# Altium footprint library WR-TBL_Pluggable Connector_3.50mm.PcbLib: 175 footprints (part 5 of 11)
Each footprint in its own frame and in the unit in brackets; x right, y up, seen from the top. Pads: shape width x height; smd on the part's side, far side on the other; paste and mask are expansions set on the pad; w line width, h text height; cw(c..) or ccw(c..) is an arc to the next point about the centre after c.
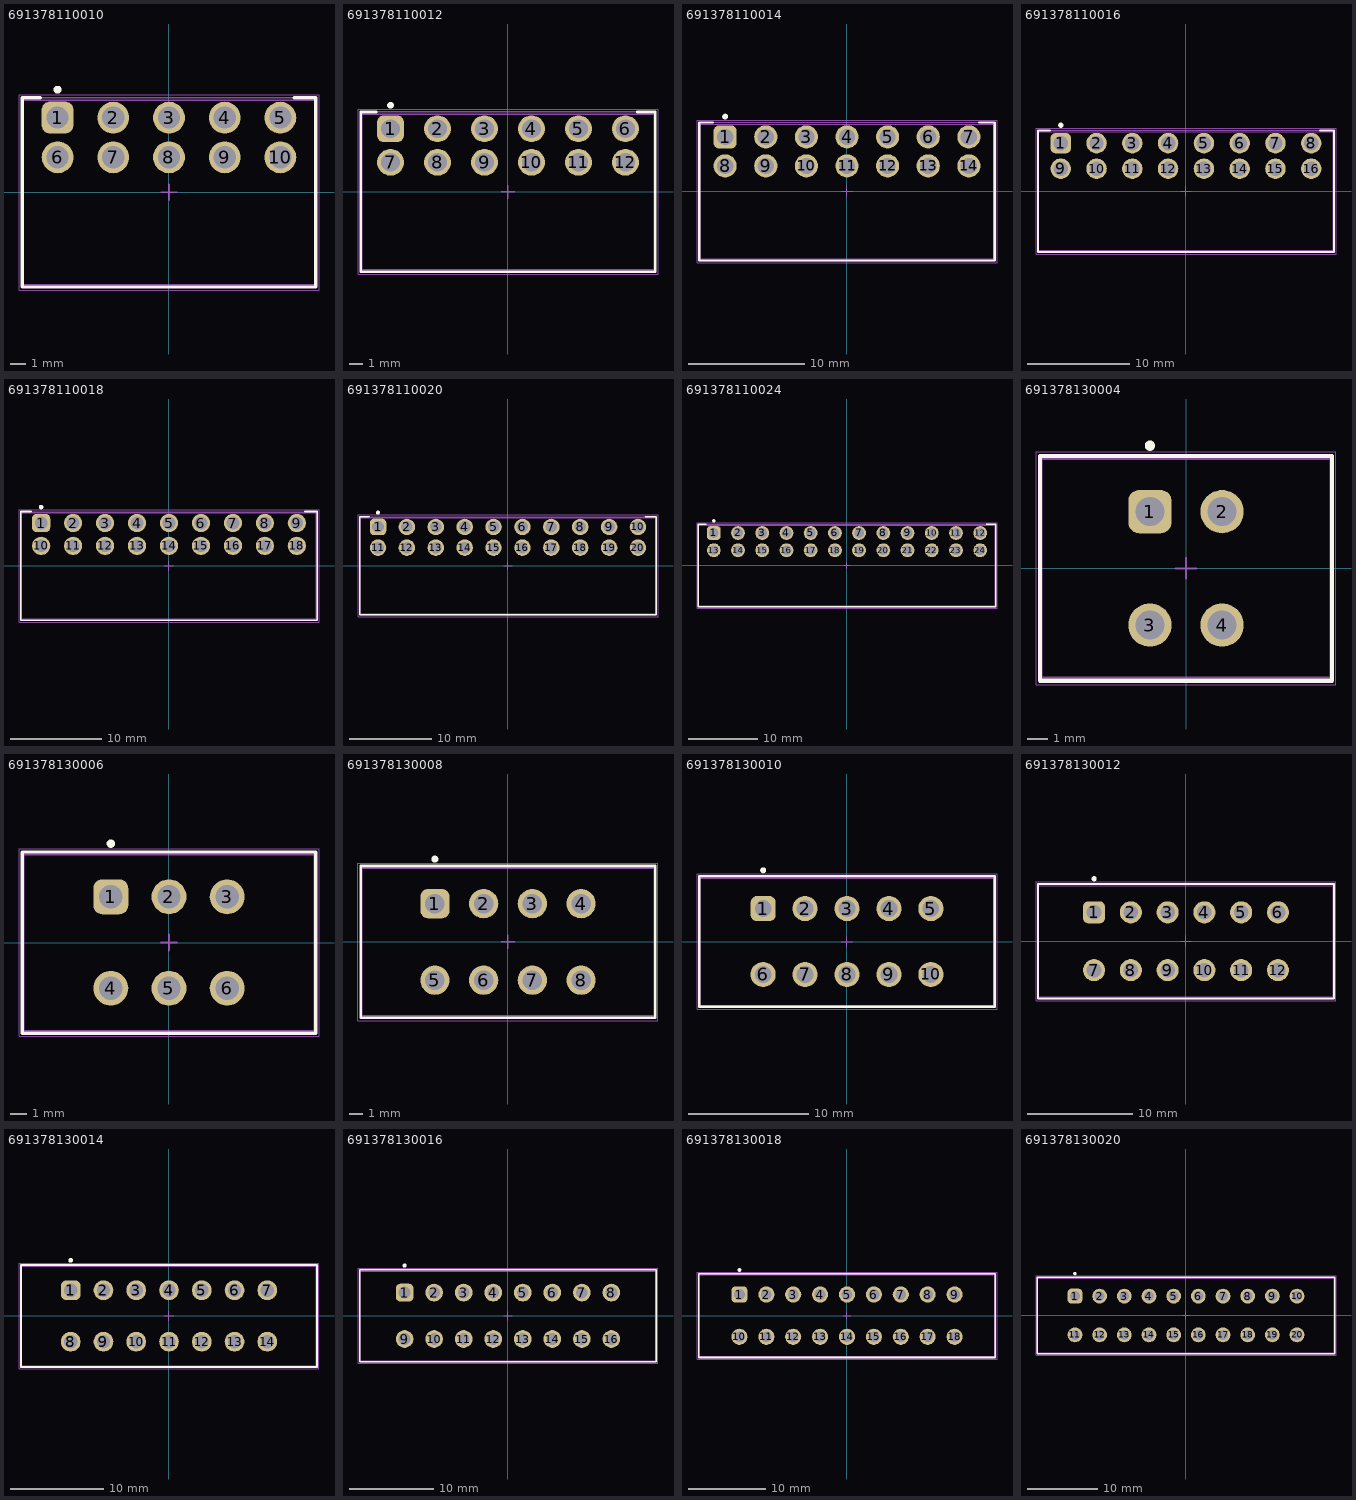
[diagram p4: the footprints below, top view; thin cyan lines are the x and y axes]

## 691378110010 [mm] "PCB Header, Horizontal, pitch 3.5mm, 10p"
height 10.8
pads (10):
  rrect50% 2x2 hole 1.4: 1(-7,4.7)
  round 2 hole 1.4: 2(-3.5,4.7) 3(0,4.7) 4(3.5,4.7) 5(7,4.7) 6(-7,2.2) 7(-3.5,2.2) 8(0,2.2) 9(3.5,2.2) 10(7,2.2)
Top Overlay:
  circle w0.25: c-7,6.45 r0.125
  lines w0.2: -8.075,5.95 -9.225,5.95 -9.225,-5.95 9.225,-5.95 9.225,5.95 7.875,5.95
Top Assembly:
  lines w0.1: -9.225,-5.95 -9.225,5.95 9.225,5.95 9.225,-5.95 -9.225,-5.95
Top Designator:
  text ".Designator" at -3.647,-0.357 h1
Top 3D Body:
  lines w0.1: -9.15,-5.8 -9.15,5.8 9.15,5.8 9.15,-5.8 -9.15,-5.8
Top Courtyard:
  lines w0.05: -9.425,-6.15 -9.425,6.15 9.425,6.15 9.425,-6.15 -9.425,-6.15
Top Component Center:
  lines w0.1: -0.5,0 0.5,0 ; 0,-0.5 0,0.5
3D body "691378110010.stp": height 10.9, standoff -3.4, extent -9.15,-5.8 9.15,5.8

## 691378110012 [mm] "PCB Header, Horizontal, pitch 3.5mm, 12p"
height 10.8
pads (12):
  rrect50% 2x2 hole 1.4: 1(-8.75,4.7)
  round 2 hole 1.4: 2(-5.25,4.7) 3(-1.75,4.7) 4(1.75,4.7) 5(5.25,4.7) 6(8.75,4.7) 7(-8.75,2.2) 8(-5.25,2.2) 9(-1.75,2.2) 10(1.75,2.2) 11(5.25,2.2) 12(8.75,2.2)
Top Overlay:
  circle w0.25: c-8.75,6.45 r0.125
  lines w0.2: -9.825,5.95 -10.975,5.95 -10.975,-5.95 10.975,-5.95 10.975,5.95 9.625,5.95
Top Assembly:
  lines w0.1: -10.975,-5.95 -10.975,5.95 10.975,5.95 10.975,-5.95 -10.975,-5.95
Top Designator:
  text ".Designator" at -3.647,-0.357 h1
Top 3D Body:
  lines w0.1: -10.9,-5.8 -10.9,5.8 10.9,5.8 10.9,-5.8 -10.9,-5.8
Top Courtyard:
  lines w0.05: -11.175,-6.15 -11.175,6.15 11.175,6.15 11.175,-6.15 -11.175,-6.15
Top Component Center:
  lines w0.1: -0.5,0 0.5,0 ; 0,-0.5 0,0.5
3D body "691378110012.stp": height 10.9, standoff -3.4, extent -10.9,-5.8 10.9,5.8

## 691378110014 [mm] "PCB Header, Horizontal, pitch 3.5mm, 14p"
height 10.8
pads (14):
  rrect50% 2x2 hole 1.4: 1(-10.5,4.7)
  round 2 hole 1.4: 2(-7,4.7) 3(-3.5,4.7) 4(0,4.7) 5(3.5,4.7) 6(7,4.7) 7(10.5,4.7) 8(-10.5,2.2) 9(-7,2.2) 10(-3.5,2.2) 11(0,2.2) 12(3.5,2.2) 13(7,2.2) 14(10.5,2.2)
Top Overlay:
  circle w0.25: c-10.5,6.45 r0.125
  lines w0.2: -11.575,5.95 -12.725,5.95 -12.725,-5.95 12.725,-5.95 12.725,5.95 11.375,5.95
Top Assembly:
  lines w0.1: -12.725,-5.95 -12.725,5.95 12.725,5.95 12.725,-5.95 -12.725,-5.95
Top Designator:
  text ".Designator" at -3.647,-0.357 h1
Top 3D Body:
  lines w0.1: -12.65,-5.8 -12.65,5.8 12.65,5.8 12.65,-5.8 -12.65,-5.8
Top Courtyard:
  lines w0.05: -12.925,-6.15 -12.925,6.15 12.925,6.15 12.925,-6.15 -12.925,-6.15
Top Component Center:
  lines w0.1: -0.5,0 0.5,0 ; 0,-0.5 0,0.5
3D body "691378110014.stp": height 10.9, standoff -3.4, extent -12.65,-5.8 12.65,5.8

## 691378110016 [mm] "PCB Header, Horizontal, pitch 3.5mm, 16p"
height 10.8
pads (16):
  rrect50% 2x2 hole 1.4: 1(-12.25,4.7)
  round 2 hole 1.4: 2(-8.75,4.7) 3(-5.25,4.7) 4(-1.75,4.7) 5(1.75,4.7) 6(5.25,4.7) 7(8.75,4.7) 8(12.25,4.7) 9(-12.25,2.2) 10(-8.75,2.2) 11(-5.25,2.2) 12(-1.75,2.2) 13(1.75,2.2) 14(5.25,2.2) 15(8.75,2.2) 16(12.25,2.2)
Top Overlay:
  circle w0.25: c-12.25,6.45 r0.125
  lines w0.2: -13.325,5.95 -14.475,5.95 -14.475,-5.95 14.475,-5.95 14.475,5.95 13.125,5.95
Top Assembly:
  lines w0.1: -14.475,-5.95 -14.475,5.95 14.475,5.95 14.475,-5.95 -14.475,-5.95
Top Designator:
  text ".Designator" at -3.647,-0.357 h1
Top 3D Body:
  lines w0.1: -14.4,-5.8 -14.4,5.8 14.4,5.8 14.4,-5.8 -14.4,-5.8
Top Courtyard:
  lines w0.05: -14.675,-6.15 -14.675,6.15 14.675,6.15 14.675,-6.15 -14.675,-6.15
Top Component Center:
  lines w0.1: -0.5,0 0.5,0 ; 0,-0.5 0,0.5
3D body "691378110016.stp": height 10.9, standoff -3.4, extent -14.4,-5.8 14.4,5.8

## 691378110018 [mm] "PCB Header, Horizontal, pitch 3.5mm, 18p"
height 10.8
pads (18):
  rrect50% 2x2 hole 1.4: 1(-14,4.7)
  round 2 hole 1.4: 2(-10.5,4.7) 3(-7,4.7) 4(-3.5,4.7) 5(0,4.7) 6(3.5,4.7) 7(7,4.7) 8(10.5,4.7) 9(14,4.7) 10(-14,2.2) 11(-10.5,2.2) 12(-7,2.2) 13(-3.5,2.2) 14(0,2.2) 15(3.5,2.2) 16(7,2.2) 17(10.5,2.2) 18(14,2.2)
Top Overlay:
  circle w0.25: c-14,6.45 r0.125
  lines w0.2: -15.075,5.95 -16.225,5.95 -16.225,-5.95 16.225,-5.95 16.225,5.95 14.875,5.95
Top Assembly:
  lines w0.1: -16.225,-5.95 -16.225,5.95 16.225,5.95 16.225,-5.95 -16.225,-5.95
Top Designator:
  text ".Designator" at -3.647,-0.357 h1
Top 3D Body:
  lines w0.1: -16.15,-5.8 -16.15,5.8 16.15,5.8 16.15,-5.8 -16.15,-5.8
Top Courtyard:
  lines w0.05: -16.425,-6.15 -16.425,6.15 16.425,6.15 16.425,-6.15 -16.425,-6.15
Top Component Center:
  lines w0.1: -0.5,0 0.5,0 ; 0,-0.5 0,0.5
3D body "691378110018.stp": height 10.9, standoff -3.4, extent -16.15,-5.8 16.15,5.8

## 691378110020 [mm] "PCB Header, Horizontal, pitch 3.5mm, 20p"
height 10.8
pads (20):
  rrect50% 2x2 hole 1.4: 1(-15.75,4.7)
  round 2 hole 1.4: 2(-12.25,4.7) 3(-8.75,4.7) 4(-5.25,4.7) 5(-1.75,4.7) 6(1.75,4.7) 7(5.25,4.7) 8(8.75,4.7) 9(12.25,4.7) 10(15.75,4.7) 11(-15.75,2.2) 12(-12.25,2.2) 13(-8.75,2.2) 14(-5.25,2.2) 15(-1.75,2.2) 16(1.75,2.2) 17(5.25,2.2) 18(8.75,2.2) 19(12.25,2.2) 20(15.75,2.2)
Top Overlay:
  circle w0.25: c-15.75,6.45 r0.125
  lines w0.2: -16.825,5.95 -17.975,5.95 -17.975,-5.95 17.975,-5.95 17.975,5.95 16.625,5.95
Top Assembly:
  lines w0.1: -17.975,-5.95 17.975,-5.95 17.975,5.95 -17.975,5.95 -17.975,-5.95
Top Designator:
  text ".Designator" at -3.647,-0.357 h1
Top 3D Body:
  lines w0.1: -17.9,-5.8 17.9,-5.8 17.9,5.8 -17.9,5.8 -17.9,-5.8
Top Courtyard:
  lines w0.05: -18.175,-6.15 18.175,-6.15 18.175,6.15 -18.175,6.15 -18.175,-6.15
Top Component Center:
  lines w0.1: -0.5,0 0.5,0 ; 0,-0.5 0,0.5
3D body "691378110020.stp": height 10.9, standoff -3.4, extent -17.9,-5.8 17.9,5.8

## 691378110024 [mm] "PCB Header, Horizontal, pitch 3.5mm, 24p"
height 10.8
pads (24):
  rrect50% 2x2 hole 1.4: 1(-19.25,4.7)
  round 2 hole 1.4: 2(-15.75,4.7) 3(-12.25,4.7) 4(-8.75,4.7) 5(-5.25,4.7) 6(-1.75,4.7) 7(1.75,4.7) 8(5.25,4.7) 9(8.75,4.7) 10(12.25,4.7) 11(15.75,4.7) 12(19.25,4.7) 13(-19.25,2.2) 14(-15.75,2.2) 15(-12.25,2.2) 16(-8.75,2.2) 17(-5.25,2.2) 18(-1.75,2.2) 19(1.75,2.2) 20(5.25,2.2) 21(8.75,2.2) 22(12.25,2.2) 23(15.75,2.2) 24(19.25,2.2)
Top Overlay:
  circle w0.25: c-19.25,6.45 r0.125
  lines w0.2: -20.325,5.95 -21.475,5.95 -21.475,-5.95 21.475,-5.95 21.475,5.95 20.125,5.95
Top Assembly:
  lines w0.1: -21.475,-5.95 21.475,-5.95 21.475,5.95 -21.475,5.95 -21.475,-5.95
Top Designator:
  text ".Designator" at -3.647,-0.357 h1
Top 3D Body:
  lines w0.1: -21.4,-5.8 21.4,-5.8 21.4,5.8 -21.4,5.8 -21.4,-5.8
Top Courtyard:
  lines w0.05: -21.675,-6.15 21.675,-6.15 21.675,6.15 -21.675,6.15 -21.675,-6.15
Top Component Center:
  lines w0.1: -0.5,0 0.5,0 ; 0,-0.5 0,0.5
3D body "691378110024.stp": height 10.9, standoff -3.4, extent -21.4,-5.8 21.4,5.8

## 691378130004 [mm] "PCB Header, pitch 3.5mm, 04p"
height 10
pads (4):
  rrect50% 2.1x2.1 hole 1.4: 1(-1.75,2.75)
  round 2.1 hole 1.4: 2(1.75,2.75) 3(-1.75,-2.75) 4(1.75,-2.75)
Top Overlay:
  circle w0.25: c-1.75,5.95 r0.125
  lines w0.2: -7.075,-5.45 7.075,-5.45 7.075,5.45 -7.075,5.45 -7.075,-5.45
Top Assembly:
  lines w0.1: -7.075,-5.45 7.075,-5.45 7.075,5.45 -7.075,5.45 -7.075,-5.45
Top Designator:
  text ".Designator" at -3.647,-0.357 h1
Top 3D Body:
  lines w0.1: -7,-5.3 7,-5.3 7,5.3 -7,5.3 -7,-5.3
Top Courtyard:
  lines w0.05: -7.275,-5.65 7.275,-5.65 7.275,5.65 -7.275,5.65 -7.275,-5.65
Top Component Center:
  lines w0.1: -0.5,0 0.5,0 ; 0,-0.5 0,0.5
3D body "691378130004.stp": height 10.05, standoff -3.45, extent -7,-5.3 7,5.3

## 691378130006 [mm] "PCB Header, pitch 3.5mm, 06p"
height 10
pads (6):
  rrect50% 2.1x2.1 hole 1.4: 1(-3.5,2.75)
  round 2.1 hole 1.4: 2(0,2.75) 3(3.5,2.75) 4(-3.5,-2.75) 5(0,-2.75) 6(3.5,-2.75)
Top Overlay:
  circle w0.25: c-3.5,5.95 r0.125
  lines w0.2: -8.825,-5.45 8.825,-5.45 8.825,5.45 -8.825,5.45 -8.825,-5.45
Top Assembly:
  lines w0.1: -8.825,-5.45 8.825,-5.45 8.825,5.45 -8.825,5.45 -8.825,-5.45
Top Designator:
  text ".Designator" at -3.647,-0.357 h1
Top 3D Body:
  lines w0.1: -8.75,-5.3 8.75,-5.3 8.75,5.3 -8.75,5.3 -8.75,-5.3
Top Courtyard:
  lines w0.05: -9.025,-5.65 9.025,-5.65 9.025,5.65 -9.025,5.65 -9.025,-5.65
Top Component Center:
  lines w0.1: -0.5,0 0.5,0 ; 0,-0.5 0,0.5
3D body "691378130006.stp": height 10.05, standoff -3.45, extent -8.75,-5.3 8.75,5.3

## 691378130008 [mm] "PCB Header, pitch 3.5mm, 08p"
height 10
pads (8):
  rrect50% 2.1x2.1 hole 1.4: 1(-5.25,2.75)
  round 2.1 hole 1.4: 2(-1.75,2.75) 3(1.75,2.75) 4(5.25,2.75) 5(-5.25,-2.75) 6(-1.75,-2.75) 7(1.75,-2.75) 8(5.25,-2.75)
Top Overlay:
  circle w0.25: c-5.25,5.95 r0.125
  lines w0.2: -10.575,-5.45 10.575,-5.45 10.575,5.45 -10.575,5.45 -10.575,-5.45
Top Assembly:
  lines w0.1: -10.575,-5.45 10.575,-5.45 10.575,5.45 -10.575,5.45 -10.575,-5.45
Top Designator:
  text ".Designator" at -3.647,-0.357 h1
Top 3D Body:
  lines w0.1: -10.5,-5.3 10.5,-5.3 10.5,5.3 -10.5,5.3 -10.5,-5.3
Top Courtyard:
  lines w0.05: -10.775,-5.65 10.775,-5.65 10.775,5.65 -10.775,5.65 -10.775,-5.65
Top Component Center:
  lines w0.1: -0.5,0 0.5,0 ; 0,-0.5 0,0.5
3D body "691378130008.stp": height 10.05, standoff -3.45, extent -10.5,-5.3 10.5,5.3

## 691378130010 [mm] "PCB Header, pitch 3.5mm, 10p"
height 10
pads (10):
  rrect50% 2.1x2.1 hole 1.4: 1(-7,2.75)
  round 2.1 hole 1.4: 2(-3.5,2.75) 3(0,2.75) 4(3.5,2.75) 5(7,2.75) 6(-7,-2.75) 7(-3.5,-2.75) 8(0,-2.75) 9(3.5,-2.75) 10(7,-2.75)
Top Overlay:
  circle w0.25: c-7,5.95 r0.125
  lines w0.2: -12.325,-5.45 -12.325,5.45 12.325,5.45 12.325,-5.45 -12.325,-5.45
Top Assembly:
  lines w0.1: -12.325,-5.45 -12.325,5.45 12.325,5.45 12.325,-5.45 -12.325,-5.45
Top Designator:
  text ".Designator" at -3.647,-0.357 h1
Top 3D Body:
  lines w0.1: -12.25,-5.3 -12.25,5.3 12.25,5.3 12.25,-5.3 -12.25,-5.3
Top Courtyard:
  lines w0.05: -12.525,-5.65 -12.525,5.65 12.525,5.65 12.525,-5.65 -12.525,-5.65
Top Component Center:
  lines w0.1: -0.5,0 0.5,0 ; 0,-0.5 0,0.5
3D body "691378130010.stp": height 10.05, standoff -3.45, extent -12.25,-5.3 12.25,5.3

## 691378130012 [mm] "PCB Header, pitch 3.5mm, 12p"
height 10
pads (12):
  rrect50% 2.1x2.1 hole 1.4: 1(-8.75,2.75)
  round 2.1 hole 1.4: 2(-5.25,2.75) 3(-1.75,2.75) 4(1.75,2.75) 5(5.25,2.75) 6(8.75,2.75) 7(-8.75,-2.75) 8(-5.25,-2.75) 9(-1.75,-2.75) 10(1.75,-2.75) 11(5.25,-2.75) 12(8.75,-2.75)
Top Overlay:
  circle w0.25: c-8.75,5.95 r0.125
  lines w0.2: -14.075,-5.45 14.075,-5.45 14.075,5.45 -14.075,5.45 -14.075,-5.45
Top Assembly:
  lines w0.1: -14.075,-5.45 14.075,-5.45 14.075,5.45 -14.075,5.45 -14.075,-5.45
Top Designator:
  text ".Designator" at -3.647,-0.357 h1
Top 3D Body:
  lines w0.1: -14,-5.3 14,-5.3 14,5.3 -14,5.3 -14,-5.3
Top Courtyard:
  lines w0.05: -14.275,-5.65 14.275,-5.65 14.275,5.65 -14.275,5.65 -14.275,-5.65
Top Component Center:
  lines w0.1: -0.5,0 0.5,0 ; 0,-0.5 0,0.5
3D body "691378130012.stp": height 10.05, standoff -3.45, extent -14,-5.3 14,5.3

## 691378130014 [mm] "PCB Header, pitch 3.5mm, 14p"
height 10
pads (14):
  rrect50% 2.1x2.1 hole 1.4: 1(-10.5,2.75)
  round 2.1 hole 1.4: 2(-7,2.75) 3(-3.5,2.75) 4(0,2.75) 5(3.5,2.75) 6(7,2.75) 7(10.5,2.75) 8(-10.5,-2.75) 9(-7,-2.75) 10(-3.5,-2.75) 11(0,-2.75) 12(3.5,-2.75) 13(7,-2.75) 14(10.5,-2.75)
Top Overlay:
  circle w0.25: c-10.5,5.95 r0.125
  lines w0.2: -15.825,-5.45 -15.825,5.45 15.825,5.45 15.825,-5.45 -15.825,-5.45
Top Assembly:
  lines w0.1: -15.825,-5.45 -15.825,5.45 15.825,5.45 15.825,-5.45 -15.825,-5.45
Top Designator:
  text ".Designator" at -3.647,-0.357 h1
Top 3D Body:
  lines w0.1: -15.75,-5.3 -15.75,5.3 15.75,5.3 15.75,-5.3 -15.75,-5.3
Top Courtyard:
  lines w0.05: -16.025,-5.65 -16.025,5.65 16.025,5.65 16.025,-5.65 -16.025,-5.65
Top Component Center:
  lines w0.1: -0.5,0 0.5,0 ; 0,-0.5 0,0.5
3D body "691378130014.stp": height 10.05, standoff -3.45, extent -15.75,-5.3 15.75,5.3

## 691378130016 [mm] "PCB Header, pitch 3.5mm, 16p"
height 10
pads (16):
  rrect50% 2.1x2.1 hole 1.4: 1(-12.25,2.75)
  round 2.1 hole 1.4: 2(-8.75,2.75) 3(-5.25,2.75) 4(-1.75,2.75) 5(1.75,2.75) 6(5.25,2.75) 7(8.75,2.75) 8(12.25,2.75) 9(-12.25,-2.75) 10(-8.75,-2.75) 11(-5.25,-2.75) 12(-1.75,-2.75) 13(1.75,-2.75) 14(5.25,-2.75) 15(8.75,-2.75) 16(12.25,-2.75)
Top Overlay:
  circle w0.25: c-12.25,5.95 r0.125
  lines w0.2: -17.575,-5.45 -17.575,5.45 17.575,5.45 17.575,-5.45 -17.575,-5.45
Top Assembly:
  lines w0.1: -17.575,-5.45 -17.575,5.45 17.575,5.45 17.575,-5.45 -17.575,-5.45
Top Designator:
  text ".Designator" at -3.647,-0.357 h1
Top 3D Body:
  lines w0.1: -17.5,-5.3 -17.5,5.3 17.5,5.3 17.5,-5.3 -17.5,-5.3
Top Courtyard:
  lines w0.05: -17.775,-5.65 -17.775,5.65 17.775,5.65 17.775,-5.65 -17.775,-5.65
Top Component Center:
  lines w0.1: -0.5,0 0.5,0 ; 0,-0.5 0,0.5
3D body "691378130016.stp": height 10.05, standoff -3.45, extent -17.5,-5.3 17.5,5.3

## 691378130018 [mm] "PCB Header, pitch 3.5mm, 18p"
height 10
pads (18):
  rrect50% 2.1x2.1 hole 1.4: 1(-14,2.75)
  round 2.1 hole 1.4: 2(-10.5,2.75) 3(-7,2.75) 4(-3.5,2.75) 5(0,2.75) 6(3.5,2.75) 7(7,2.75) 8(10.5,2.75) 9(14,2.75) 10(-14,-2.75) 11(-10.5,-2.75) 12(-7,-2.75) 13(-3.5,-2.75) 14(0,-2.75) 15(3.5,-2.75) 16(7,-2.75) 17(10.5,-2.75) 18(14,-2.75)
Top Overlay:
  circle w0.25: c-14,5.95 r0.125
  lines w0.2: -19.325,-5.45 19.325,-5.45 19.325,5.45 -19.325,5.45 -19.325,-5.45
Top Assembly:
  lines w0.1: -19.325,-5.45 19.325,-5.45 19.325,5.45 -19.325,5.45 -19.325,-5.45
Top Designator:
  text ".Designator" at -3.647,-0.357 h1
Top 3D Body:
  lines w0.1: -19.25,-5.3 19.25,-5.3 19.25,5.3 -19.25,5.3 -19.25,-5.3
Top Courtyard:
  lines w0.05: -19.525,-5.65 19.525,-5.65 19.525,5.65 -19.525,5.65 -19.525,-5.65
Top Component Center:
  lines w0.1: -0.5,0 0.5,0 ; 0,-0.5 0,0.5
3D body "691378130018.stp": height 10.05, standoff -3.45, extent -19.25,-5.3 19.25,5.3

## 691378130020 [mm] "PCB Header, pitch 3.5mm, 20p"
height 10
pads (20):
  rrect50% 2.1x2.1 hole 1.4: 1(-15.75,2.75)
  round 2.1 hole 1.4: 2(-12.25,2.75) 3(-8.75,2.75) 4(-5.25,2.75) 5(-1.75,2.75) 6(1.75,2.75) 7(5.25,2.75) 8(8.75,2.75) 9(12.25,2.75) 10(15.75,2.75) 11(-15.75,-2.75) 12(-12.25,-2.75) 13(-8.75,-2.75) 14(-5.25,-2.75) 15(-1.75,-2.75) 16(1.75,-2.75) 17(5.25,-2.75) 18(8.75,-2.75) 19(12.25,-2.75) 20(15.75,-2.75)
Top Overlay:
  circle w0.25: c-15.75,5.95 r0.125
  lines w0.2: -21.075,-5.45 21.075,-5.45 21.075,5.45 -21.075,5.45 -21.075,-5.45
Top Assembly:
  lines w0.1: -21.075,-5.45 21.075,-5.45 21.075,5.45 -21.075,5.45 -21.075,-5.45
Top Designator:
  text ".Designator" at -3.647,-0.357 h1
Top 3D Body:
  lines w0.1: -21,-5.3 21,-5.3 21,5.3 -21,5.3 -21,-5.3
Top Courtyard:
  lines w0.05: -21.275,-5.65 21.275,-5.65 21.275,5.65 -21.275,5.65 -21.275,-5.65
Top Component Center:
  lines w0.1: -0.5,0 0.5,0 ; 0,-0.5 0,0.5
3D body "691378130020.stp": height 10.05, standoff -3.45, extent -21,-5.3 21,5.3